# Altium footprint library ARJM11D7114ABEW2.PcbLib: 1 footprints
Each footprint in its own frame and in the unit in brackets; x right, y up, seen from the top. Pads: shape width x height; smd on the part's side, far side on the other; paste and mask are expansions set on the pad; w line width, h text height; cw(c..) or ccw(c..) is an arc to the next point about the centre after c.
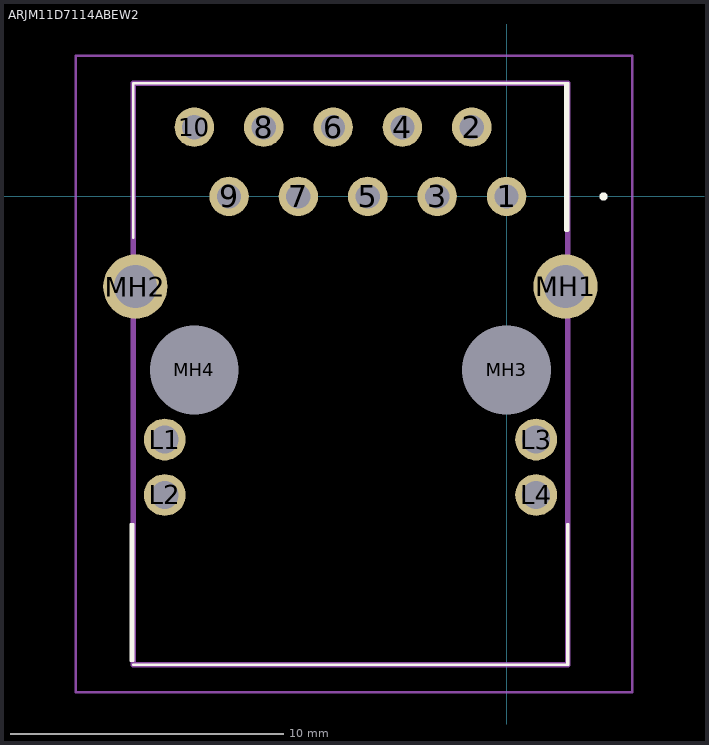
[diagram p0: the footprint, top view; thin cyan lines are the x and y axes]

## ARJM11D7114ABEW2 [mm]
pads (18):
  round 1.446 hole 0.89: 1(0,0) 2(-1.27,2.54) 3(-2.54,0) 4(-3.81,2.54) 5(-5.08,0) 6(-6.35,2.54) 7(-7.62,0) 8(-8.89,2.54) 9(-10.16,0) 10(-11.43,2.54)
  round 1.53 hole 1.02: L1(-12.515,-8.9) L2(-12.515,-10.93) L3(1.085,-8.9) L4(1.085,-10.93)
  round 2.355 hole 1.57: MH1(2.16,-3.3) MH2(-13.59,-3.3)
  round 1.625 hole 3.25 unplated: MH3(0,-6.35) MH4(-11.43,-6.35)
Top Overlay:
  lines w0.1: -13.665,-17.15 2.235,-17.15 ; -13.665,-17.15 -13.665,-17.15 ; -13.665,-17.15 2.235,-17.15 ; -13.665,-1.5 -13.665,-1.5 ; -13.665,-1.5 -13.665,4.15 ; -13.665,-1.5 -13.665,4.15 ; -13.665,4.15 -13.665,4.15 ; -13.665,4.15 2.16,4.15 ; -13.665,4.15 2.16,4.15 ; -13.665,4.15 -13.665,4.15 ; 2.16,4.15 2.16,4.15 ; 2.16,4.15 2.25,4.15 2.25,-1.25 2.16,-1.25 2.16,4.15 ; 2.235,-17.15 2.25,-17.15 2.25,-12 2.235,-12 2.235,-17.15 ; 2.235,-17.15 2.235,-17.15 ; -13.75,-17 -13.665,-17 -13.665,-12 -13.75,-12 -13.75,-17
  lines w0.2: 3.5,0 3.5,0 ; 3.5,0 ccw(c3.55,0) 3.6,0 ; 3.5,0 cw(c3.55,0) 3.6,0 ; 3.5,0 3.5,0 ; 3.5,0 ccw(c3.55,0) 3.6,0 ; 3.6,0 3.6,0
Mechanical 15:
  lines w0.2: -13.665,-17.15 2.235,-17.15 2.235,4.15 -13.665,4.15 -13.665,-17.15
Mechanical 20:
  lines w0.1: -15.768,-18.15 4.6,-18.15 4.6,5.15 -15.768,5.15 -15.768,-18.15